# Altium footprint library L298N_MOTOR.PcbLib: 1 footprints
Each footprint in its own frame and in the unit in brackets; x right, y up, seen from the top. Pads: shape width x height; smd on the part's side, far side on the other; paste and mask are expansions set on the pad; w line width, h text height; cw(c..) or ccw(c..) is an arc to the next point about the centre after c.
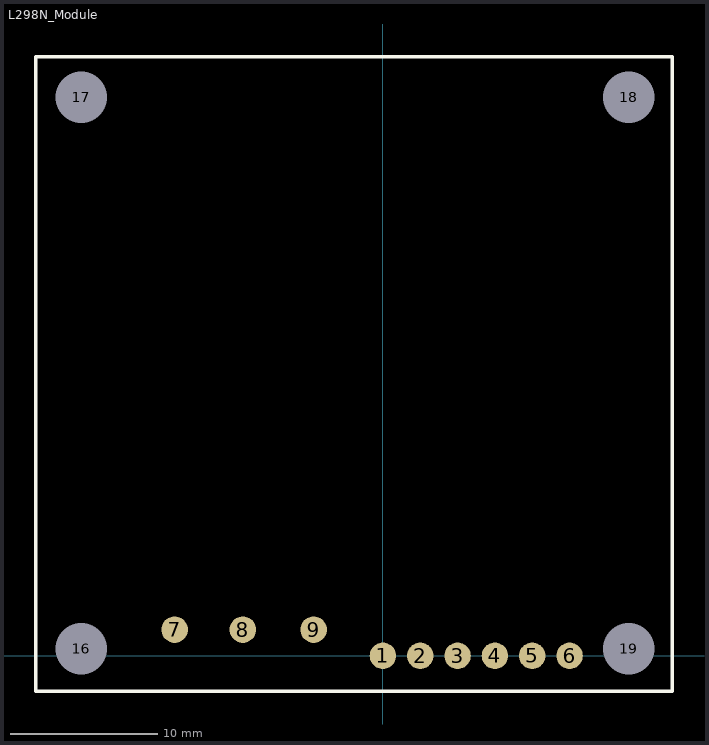
[diagram p0: the footprint, top view; thin cyan lines are the x and y axes]

## L298N_Module [mm]
pads (13):
  round 1.8 all layers, no hole: 1(0,0) 2(2.54,0) 3(5.08,0) 4(7.62,0) 5(10.16,0) 6(12.7,0) 7(-14.174,1.778) 8(-9.534,1.778) 9(-4.714,1.778)
  round 1.524 hole 3.5: 16(-20.518,0.476) 17(-20.518,38) 18(16.736,38) 19(16.736,0.476)
Top Overlay:
  lines w0.254: -23.622,-2.413 19.685,-2.413 19.685,40.767 -23.622,40.767 -23.622,-2.413
3D body "L298N Motor Driver.STEP": height 26, standoff 0, extent -23.688,-2.7 19.812,40.8